# Altium footprint library IC_TPS566231RQFR.PcbLib: 1 footprints
Each footprint in its own frame and in the unit in brackets; x right, y up, seen from the top. Pads: shape width x height; smd on the part's side, far side on the other; paste and mask are expansions set on the pad; w line width, h text height; cw(c..) or ccw(c..) is an arc to the next point about the centre after c.
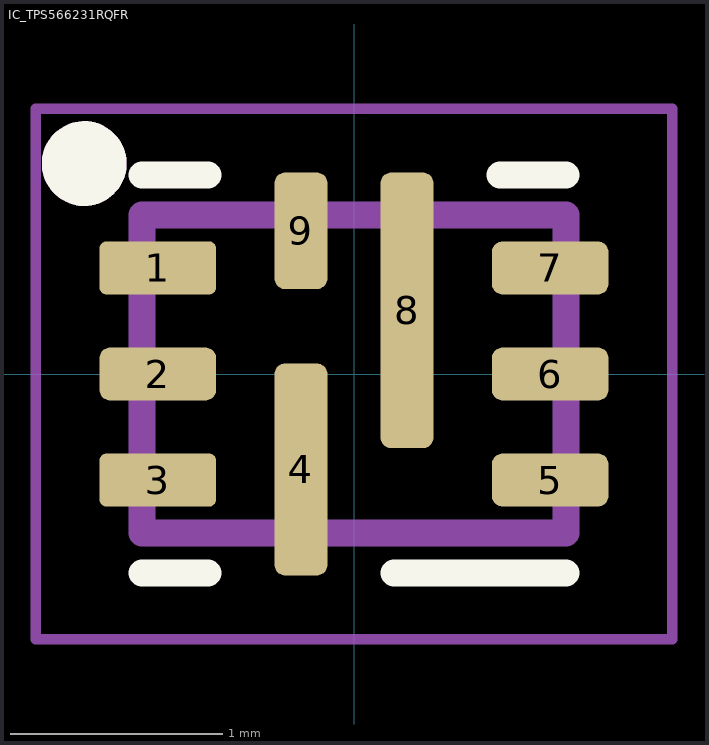
[diagram p0: the footprint, top view; thin cyan lines are the x and y axes]

## IC_TPS566231RQFR [mm]
height 1.1
pads (9):
  rrect25% 0.55x0.25 smd mask+0: 1(-0.925,0.5) 3(-0.925,-0.5)
  rrect40% 0.55x0.25 smd mask+0: 2(-0.925,0) 5(0.925,-0.5) 6(0.925,0) 7(0.925,0.5)
  rrect40% 0.25x1 smd mask+0: 4(-0.25,-0.45)
  rrect40% 0.25x1.3 smd mask+0: 8(0.25,0.3)
  rrect40% 0.25x0.55 smd mask+0: 9(-0.25,0.675)
Top Overlay:
  circle w0.2: c-1.272,0.992 r0.1
  lines w0.127: -1,-0.939 -0.689,-0.939 ; -1,0.939 -0.689,0.939 ; 0.189,-0.939 1,-0.939 ; 0.689,0.939 1,0.939
Top Solder:
  drawing of 9 lines, arcs and shapes, not listed
Mechanical 13:
  circle w0.2: c-1.272,0.992 r0.1
  lines w0.1: -1,-0.75 -1,0.75 1,0.75 1,-0.75 -1,-0.75
  lines w0.127: -1,-0.75 1,-0.75 1,0.75 -1,0.75 -1,-0.75
Mechanical 15:
  lines w0.05: -1.5,-1.25 1.5,-1.25 1.5,1.25 -1.5,1.25 -1.5,-1.25
3D body "TPS566231RQFR.stp": height 1, standoff 0, extent -1,-0.75 1,0.75